# Altium footprint library Sensor$.PcbLib: 43 footprints (part 2 of 3)
Each footprint in its own frame and in the unit in brackets; x right, y up, seen from the top. Pads: shape width x height; smd on the part's side, far side on the other; paste and mask are expansions set on the pad; w line width, h text height; cw(c..) or ccw(c..) is an arc to the next point about the centre after c.
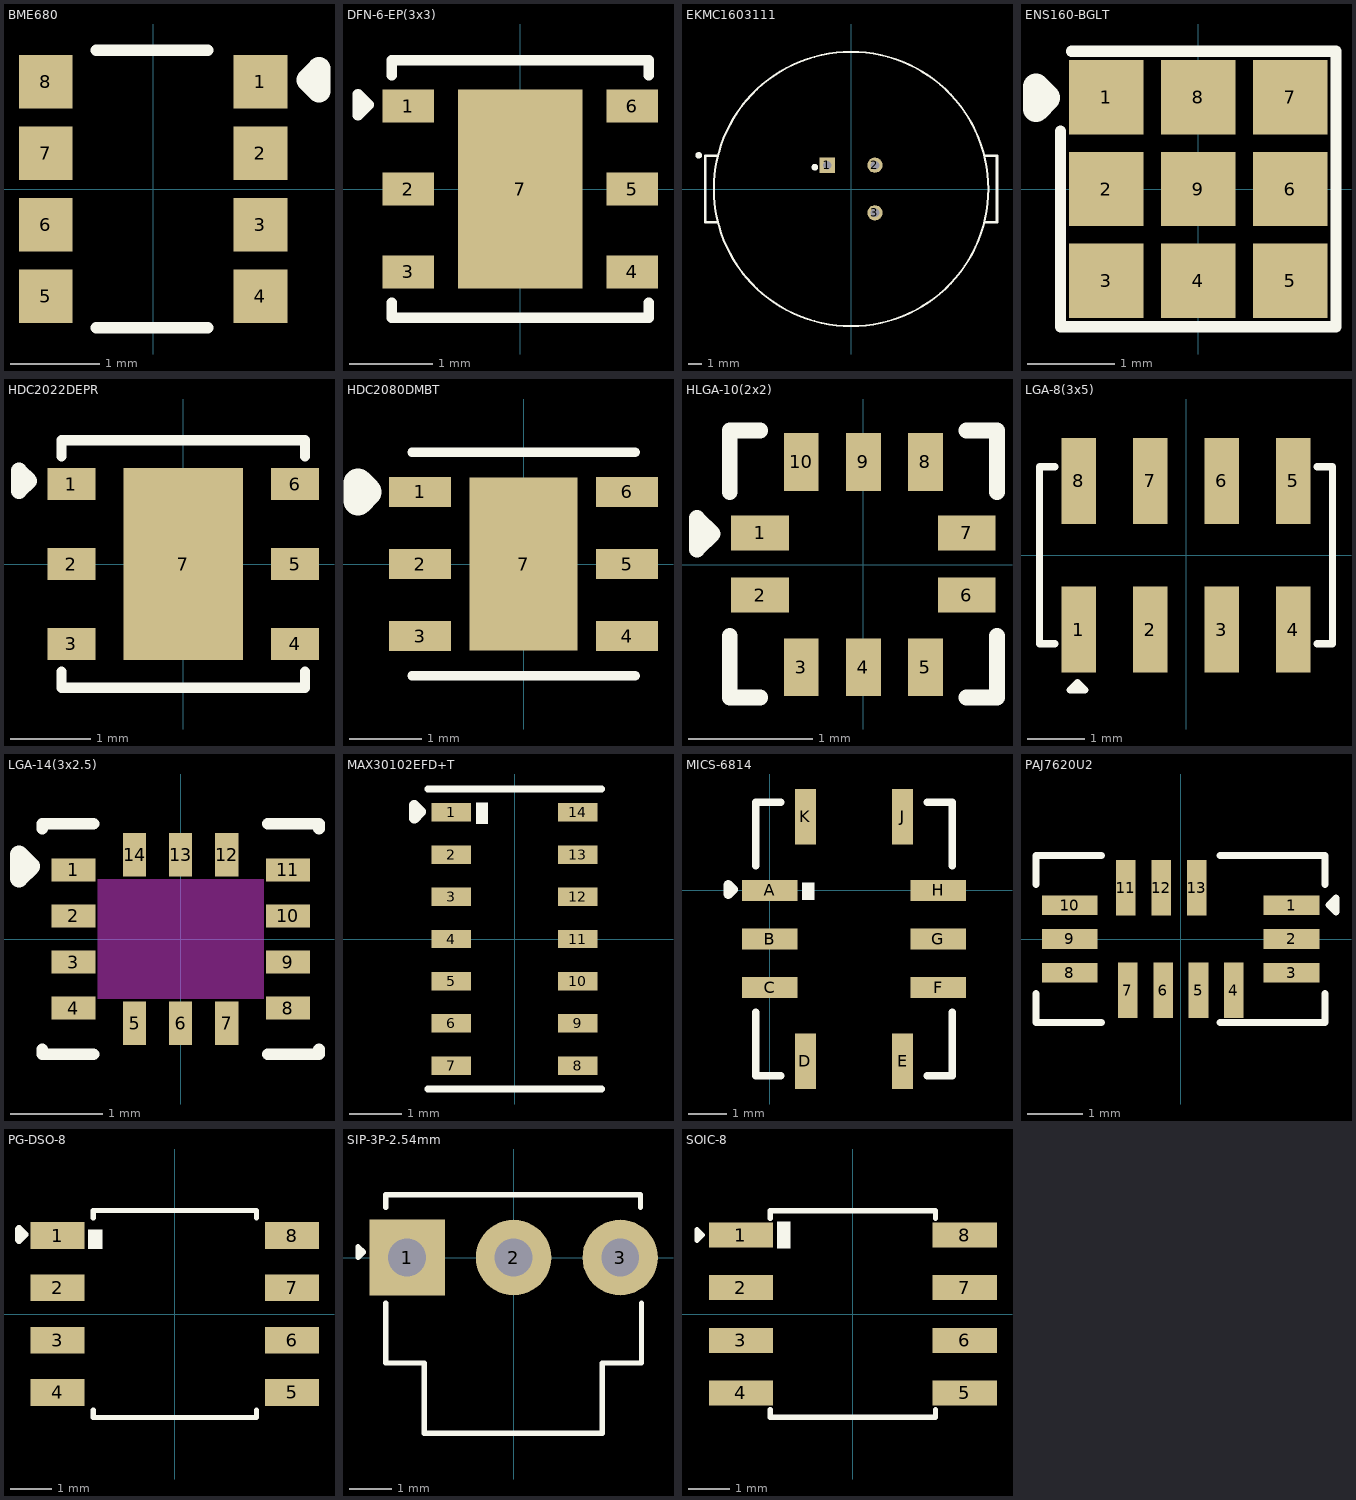
[diagram p1: the footprints below, top view; thin cyan lines are the x and y axes]

## BME680 [mm]
pads (8):
  rect 0.6x0.6 smd: 1(1.2,1.2) 2(1.2,0.4) 3(1.2,-0.4) 4(1.2,-1.2) 5(-1.2,-1.2) 6(-1.2,-0.4) 7(-1.2,0.4) 8(-1.2,1.2)
Top Overlay:
  lines w0.127: -0.635,-1.549 0.61,-1.549 ; -0.635,1.549 0.61,1.549
  lines w0.254: 1.727,1.219 1.854,1.092 1.854,1.346 1.727,1.219
3D body "BME680--3DModel-STEP-56544.STEP": height 1, standoff 0, extent -1.5,-1.5 1.5,1.5

## DFN-6-EP(3x3) [mm]
pads (7):
  rect 0.62x0.4 smd: 1(-1.35,1) 2(-1.35,0) 3(-1.35,-1) 4(1.35,-1) 5(1.35,0) 6(1.35,1)
  rect 1.5x2.4 smd: 7(0,0)
Top Overlay:
  lines w0.127: -1.549,-1.372 -1.549,-1.549 1.549,-1.549 1.549,-1.372 ; -1.549,1.372 -1.549,1.549 1.549,1.549 1.549,1.372 ; -1.956,0.889 -1.829,1.016 -1.956,1.143 -1.956,0.889
3D body "HTU21D--3DModel-STEP-56544.STEP": height 0.9, standoff 0, extent -1.5,-1.5 1.5,1.5

## EKMC1603111 [mm]
pads (3):
  rect 1.15x1.15 hole 0.65: 1(-1.796,1.796)
  round 1.15 hole 0.65: 2(1.796,1.796) 3(1.796,-1.796)
Top Overlay:
  circle w0.25: c-11.5,2.54 r0.125
  circle w0.15: c0,0 r10.35
  circle w0.25: c-2.736,1.644 r0.125
  lines w0.2: -10.1,-2.5 -11,-2.5 -11,2.5 -10.1,2.5 ; 10.1,-2.5 11,-2.5 11,2.5 10.1,2.5
3D body "UNK_Panasonic_Electric_Works_EKMC1603111_eec.STEP": height 20.72, standoff -4.6, extent -11,-10.35 11,10.35

## ENS160-BGLT [mm]
pads (9):
  rect 0.85x0.85 smd paste+0 mask+0.055: 1(-1.05,1.05) 2(-1.05,0) 3(-1.05,-1.05) 4(0,-1.05) 5(1.05,-1.05) 6(1.05,0) 7(1.05,1.05) 8(0,1.05) 9(0,0)
Top Overlay:
  lines w0.127: -1.575,0.66 -1.575,-1.575 1.575,-1.575 1.575,1.575 -1.448,1.575
  lines w0.3: -1.854,0.915 -1.727,1.042 -1.854,1.169 -1.854,0.915
3D body "ENS160-BGLT.STEP": height 0.9, standoff -0.05, extent -1.5,-1.5 1.5,1.5

## HDC2022DEPR [mm]
pads (7):
  rect 0.6x0.4 smd: 1(-1.4,1) 2(-1.4,0) 3(-1.4,-1) 4(1.4,-1) 5(1.4,0) 6(1.4,1)
  rect 1.5x2.4 smd: 7(0,0)
Top Overlay:
  lines w0.127: -1.524,-1.346 -1.524,-1.549 1.524,-1.549 1.524,-1.346 ; -1.524,1.346 -1.524,1.549 1.524,1.549 1.524,1.346
  lines w0.2: -2.057,0.914 -1.93,1.041 -2.057,1.168 -2.057,0.914
3D body "DEP0006A.stp": height 1.06, standoff 0, extent -1.5,-1.5 1.5,1.5

## HDC2080DMBT [mm] "DFN-6(3x3)"
pads (7):
  rect 0.86x0.42 smd: 1(-1.435,1) 2(-1.435,0) 3(-1.435,-1) 4(1.435,-1) 5(1.435,0) 6(1.435,1)
  rect 1.5x2.4 smd paste-2: 7(0,0)
Top Overlay:
  lines w0.127: -1.55,-1.55 1.55,-1.55 ; -1.55,1.55 1.55,1.55
  lines w0.4: -2.299,0.873 -2.299,1.127 -2.172,1 -2.299,0.873
3D body "step_temp.STEP": height 0.75, standoff -0.05, extent -1.5,-1.5 1.5,1.5

## HLGA-10(2x2) [mm]
pads (10):
  rect 0.465x0.28 smd paste+0 mask+0.051: 1(-0.833,0.255) 2(-0.833,-0.245) 6(0.833,-0.245) 7(0.833,0.255)
  rect 0.28x0.465 smd paste+0 mask+0.051: 3(-0.5,-0.828) 4(0,-0.828) 5(0.5,-0.828) 8(0.5,0.828) 9(0,0.828) 10(-0.5,0.828)
Top Overlay:
  lines w0.127: -1.076,-0.575 -1.076,-1.071 -0.831,-1.071 ; -1.076,0.585 -1.076,1.081 -0.831,1.081 ; 0.831,-1.071 1.076,-1.071 1.076,-0.575 ; 0.831,1.081 1.076,1.081 1.076,0.585 ; -1.341,0.122 -1.214,0.249 -1.341,0.376 -1.341,0.122
3D body "C2827824.step": height 0.8, standoff 0, extent -1,-0.995 1,1.005

## LGA-8(3x5) [mm]
pads (8):
  rect 0.6x1.5 smd paste+0 mask+0.051: 1(-1.875,-1.3) 2(-0.625,-1.3) 3(0.625,-1.3) 4(1.875,-1.3) 5(1.875,1.3) 6(0.625,1.3) 7(-0.625,1.3) 8(-1.875,1.3)
Top Overlay:
  lines w0.127: -2.298,-1.548 -2.565,-1.548 -2.565,1.55 -2.298,1.55 ; 2.298,-1.548 2.565,-1.548 2.565,1.55 2.298,1.55 ; -2.027,-2.357 -1.773,-2.357 -1.9,-2.23 -2.027,-2.357
3D body "SOT1768-1_TSON8_NXP.step": height 1.2, standoff 0, extent -2.502,-1.499 2.502,1.499

## LGA-14(3x2.5) [mm]
pads (14):
  rect 0.475x0.25 smd mask+0.05: 1(-1.162,0.75) 2(-1.162,0.25) 3(-1.162,-0.25) 4(-1.162,-0.75) 8(1.162,-0.75) 9(1.162,-0.25) 10(1.162,0.25) 11(1.162,0.75)
  rect 0.25x0.475 smd mask+0.05: 5(-0.5,-0.913) 6(0,-0.913) 7(0.5,-0.913) 12(0.5,0.913) 13(0,0.913) 14(-0.5,0.913)
Top Overlay:
  lines w0.127: -1.5,-1.195 -1.5,-1.25 -0.945,-1.25 ; -1.5,1.195 -1.5,1.25 -0.945,1.25 ; 0.945,-1.25 1.5,-1.25 1.5,-1.195 ; 0.945,1.25 1.5,1.25 1.5,1.195
  lines w0.2: -1.753,0.66 -1.626,0.787 -1.753,0.914 -1.753,0.66
Keep-Out Layer:
  region: 0.9,-0.65 -0.9,-0.65 -0.9,0.65 0.9,0.65
3D body "step_temp.STEP": height 0.86, standoff 0, extent -1.5,-1.25 1.5,1.25

## MAX30102EFD+T [mm]
pads (14):
  rect 0.75x0.35 smd: 1(-1.2,2.4) 2(-1.2,1.6) 3(-1.2,0.8) 4(-1.2,0) 5(-1.2,-0.8) 6(-1.2,-1.6) 7(-1.2,-2.4) 8(1.2,-2.4) 9(1.2,-1.6) 10(1.2,-0.8) 11(1.2,0) 12(1.2,0.8) 13(1.2,1.6) 14(1.2,2.4)
Top Overlay:
  rectangle: -0.737,2.184 -0.508,2.591
  lines w0.127: -1.651,-2.845 1.651,-2.845 ; -1.651,2.845 1.651,2.845
  lines w0.2: -1.905,2.286 -1.778,2.413 -1.905,2.54 -1.905,2.286
3D body "MAX30102EFD+T.STEP": height 1.65, standoff 0, extent -1.65,-2.8 1.65,2.8

## MICS-6814 [mm]
pads (10):
  rect 1.45x0.55 smd: A(0,0) B(0,-1.27) C(0,-2.54) F(4.4,-2.54) G(4.4,-1.27) H(4.4,0)
  rect 0.55x1.45 smd: D(0.93,-4.47) E(3.47,-4.47) J(3.47,1.93) K(0.93,1.93)
Top Overlay:
  rectangle: 0.838,-0.254 1.168,0.203
  lines w0.2: -0.375,-3.19 -0.375,-4.845 0.28,-4.845 ; -0.375,0.65 -0.375,2.305 0.28,2.305 ; 4.12,-4.845 4.775,-4.845 4.775,-3.19 ; 4.12,2.305 4.775,2.305 4.775,0.65
  lines w0.254: -1.092,-0.102 -1.092,0.152 -0.965,0.025 -1.092,-0.102
3D body "IC_Amphenol_MICS-6814_eec.STEP": height 1.92, standoff 0, extent -0.3,-4.77 4.7,2.23

## MPL3115A2R1 [mm]

## PAJ7620U2 [mm]
pads (13):
  rect 1x0.352 smd: 1(1.994,0.61) 2(1.994,0) 3(1.994,-0.61) 8(-1.994,-0.61) 9(-1.994,0) 10(-1.994,0.61)
  rect 0.352x1 smd: 4(0.957,-0.92) 5(0.322,-0.92) 6(-0.313,-0.92) 7(-0.948,-0.92) 11(-0.983,0.92) 12(-0.348,0.92) 13(0.287,0.92)
Top Overlay:
  lines w0.127: -2.6,-0.981 -2.6,-1.5 -1.421,-1.5 ; -2.6,0.981 -2.6,1.5 -1.421,1.5 ; 0.713,-1.5 2.6,-1.5 2.6,-0.981 ; 0.713,1.5 2.6,1.5 2.6,0.981 ; 2.667,0.61 2.794,0.737 2.794,0.483 2.667,0.61
3D body "PAJ620U2.STEP": height 1.92, standoff -0.01, extent -2.6,-1.5 2.6,1.5

## PG-DSO-8 [mm]
pads (8):
  rect 1.31x0.65 smd: 1(-2.845,1.905) 2(-2.845,0.635) 3(-2.845,-0.635) 4(-2.845,-1.905) 5(2.845,-1.905) 6(2.845,-0.635) 7(2.845,0.635) 8(2.845,1.905)
Top Overlay:
  rectangle: -2.108,1.575 -1.753,2.057
  lines w0.127: -1.981,-2.337 -1.981,-2.515 1.981,-2.515 1.981,-2.337 ; -1.981,2.337 -1.981,2.515 1.981,2.515 1.981,2.337
  lines w0.2: -3.785,1.803 -3.785,2.057 -3.658,1.93 -3.785,1.803
3D body "User Library-SOIC-8-1.STEP": height 1.7, standoff -0.05, extent -3,-2.45 3,2.45

## SIP-3P-2.54mm [mm]
pads (3):
  rect 1.8x1.8 hole 0.9: 1(-2.54,0)
  round 1.8 hole 0.9: 2(0,0) 3(2.54,0)
Top Overlay:
  lines w0.127: -3.048,-1.092 -3.048,-2.515 -2.134,-2.515 -2.134,-4.191 2.108,-4.191 2.108,-2.515 3.048,-2.515 3.048,-1.092 ; -3.048,1.194 -3.048,1.499 3.023,1.499 3.023,1.194 ; -3.708,0 -3.581,0.127 -3.708,0.254 -3.708,0
3D body "IRM-3638T.stp": height 8.35, standoff -5, extent -3,-4.14 3,1.46

## SOIC-8 [mm]
pads (8):
  rect 1.55x0.6 smd: 1(-2.7,1.905) 2(-2.7,0.635) 3(-2.7,-0.635) 4(-2.7,-1.905) 5(2.7,-1.905) 6(2.7,-0.635) 7(2.7,0.635) 8(2.7,1.905)
Top Overlay:
  rectangle: -1.829,1.575 -1.499,2.235
  lines w0.127: -1.991,-2.311 -1.991,-2.489 1.991,-2.489 1.991,-2.311 ; -1.991,2.311 -1.991,2.489 1.991,2.489 1.991,2.311 ; -3.759,1.778 -3.632,1.905 -3.759,2.032 -3.759,1.778
3D body "User Library-SOIC-8-1.STEP": height 1.7, standoff -0.05, extent -3,-2.45 3,2.45